# Altium footprint library Aaron_PcbLib.PcbLib: 1 footprints
Each footprint in its own frame and in the unit in brackets; x right, y up, seen from the top. Pads: shape width x height; smd on the part's side, far side on the other; paste and mask are expansions set on the pad; w line width, h text height; cw(c..) or ccw(c..) is an arc to the next point about the centre after c.
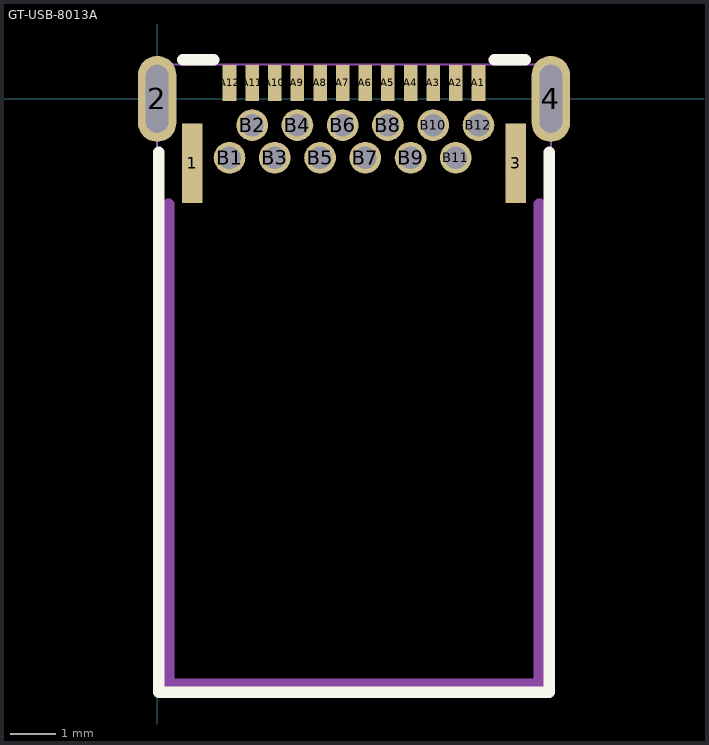
[diagram p0: the footprint, top view; thin cyan lines are the x and y axes]

## GT-USB-8013A [mm]
pads (28):
  rect 0.45x1.76 smd paste-100 mask+0.05: 1(0.775,-1.42) 3(7.925,-1.42)
  oval 0.85x1.9 hole 0.5 slot 1.5 at 90 deg paste-2539.97 mask+0.05: 2(0,0) 4(8.7,0)
  rect 0.3x0.8 smd paste-100 mask+0.05: A1(7.1,0.35) A2(6.6,0.35) A3(6.1,0.35) A4(5.6,0.35) A5(5.1,0.35) A6(4.6,0.35) A7(4.1,0.35) A8(3.6,0.35) A9(3.1,0.35) A10(2.6,0.35) A11(2.1,0.35) A12(1.6,0.35)
  round 0.7 hole 0.5 paste-2539.97 mask+0.05: B1(1.6,-1.3) B2(2.1,-0.58) B3(2.6,-1.3) B4(3.1,-0.58) B5(3.6,-1.3) B6(4.1,-0.58) B7(4.6,-1.3) B8(5.1,-0.58) B9(5.6,-1.3) B10(6.1,-0.58) B11(6.6,-1.3) B12(7.1,-0.58)
Top Overlay:
  lines w0.254: 0.032,-1.18 0.032,-13.108 8.668,-13.108 8.668,-1.18 ; 0.563,0.862 1.248,0.862 ; 7.452,0.862 8.137,0.862
Top Paste:
  drawing of 26 lines, arcs and shapes, not listed
Mechanical 6:
  region: 0.377,-2.335 0.377,-12.808 8.323,-12.808 8.323,-2.335 8.323,-2.282 8.397,-2.208 8.503,-2.208 8.577,-2.282 8.577,-2.335 8.577,-12.935 8.577,-12.96 8.558,-13.007 8.522,-13.043 8.475,-13.062 8.45,-13.062 0.25,-13.062 0.225,-13.062 0.178,-13.043 0.142,-13.007 0.123,-12.96 0.123,-12.935 0.123,-2.335 0.123,-2.282 0.197,-2.208 0.303,-2.208 0.377,-2.282
Mechanical 15:
  drawing of 33 lines, arcs and shapes, not listed
3D body "TYPEC.step": height 1.45, standoff -1.6, extent 0.022,-12.975 8.732,0.775